# Altium footprint library Gateway_Academic.PcbLib: 49 footprints (part 3 of 4)
Each footprint in its own frame and in the unit in brackets; x right, y up, seen from the top. Pads: shape width x height; smd on the part's side, far side on the other; paste and mask are expansions set on the pad; w line width, h text height; cw(c..) or ccw(c..) is an arc to the next point about the centre after c.
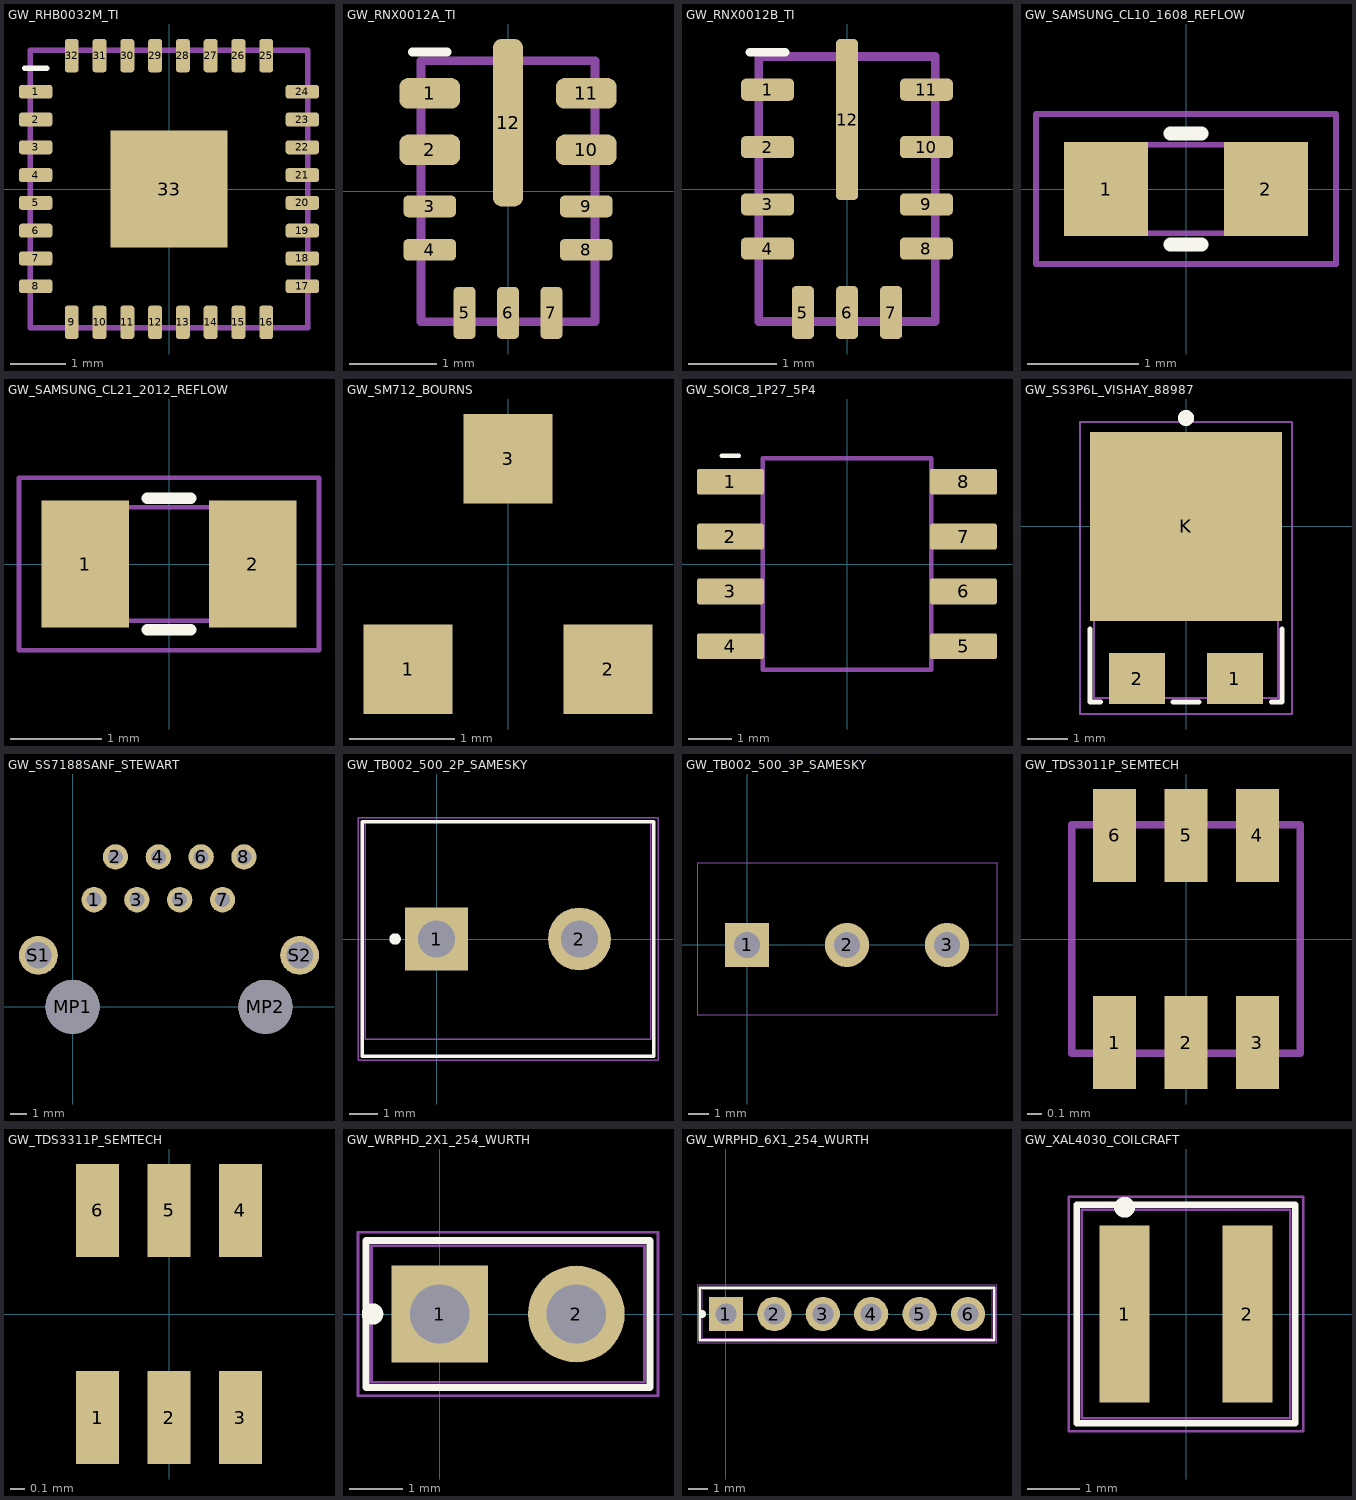
[diagram p2: the footprints below, top view; thin cyan lines are the x and y axes]

## GW_RHB0032M_TI [mm] "SNLS647I table5-1 pp5-6; exposed pad p7; RHB0032M 4223725/A PDF pp111-113; EP33 paste suppressed; four .94mm square paste windows at +/- .57mm (TI 80% example). No automatic thermal-via drill holes."
pads (33):
  rrect40% 0.6x0.25 smd paste+0 mask+0.05: 1(-2.4,1.75) 2(-2.4,1.25) 3(-2.4,0.75) 4(-2.4,0.25) 5(-2.4,-0.25) 6(-2.4,-0.75) 7(-2.4,-1.25) 8(-2.4,-1.75) 17(2.4,-1.75) 18(2.4,-1.25) 19(2.4,-0.75) 20(2.4,-0.25) 21(2.4,0.25) 22(2.4,0.75) 23(2.4,1.25) 24(2.4,1.75)
  rrect40% 0.25x0.6 smd paste+0 mask+0.05: 9(-1.75,-2.4) 10(-1.25,-2.4) 11(-0.75,-2.4) 12(-0.25,-2.4) 13(0.25,-2.4) 14(0.75,-2.4) 15(1.25,-2.4) 16(1.75,-2.4) 25(1.75,2.4) 26(1.25,2.4) 27(0.75,2.4) 28(0.25,2.4) 29(-0.25,2.4) 30(-0.75,2.4) 31(-1.25,2.4) 32(-1.75,2.4)
  rect 2.1x2.1 smd paste-1.05 mask+0.05: 33(0,0)
Top Overlay:
  lines w0.1: -2.6,2.175 -2.2,2.175
  text ".Designator" at 0,3.3 h1
Top Paste:
  rectangle: -1.04,-1.04 -0.1,-0.1
  rectangle: -1.04,0.1 -0.1,1.04
  rectangle: 0.1,-1.04 1.04,-0.1
  rectangle: 0.1,0.1 1.04,1.04
Mechanical 1:
  lines w0.1: -2.5,-2.5 2.5,-2.5 2.5,2.5 -2.5,2.5 -2.5,-2.5

## GW_RNX0012A_TI [mm] "SNVSB49D p4; RNX0012A 4222858/A PDF pp44-46 and RNX0012B 4223969/C pp47-49; Confirm actual RNX revision before use. Pin12 SW: no ground tab. Paste12 suppressed, two .25x.812mm windows at y=.2815,1.2935 per drawing; 0.125mm stencil."
pads (12):
  rrect57% 0.7x0.35 smd paste+0 mask-0.05: 1(-0.9,1.125) 2(-0.9,0.475) 10(0.9,0.475) 11(0.9,1.125)
  rrect40% 0.6x0.25 smd paste+0 mask+0.05: 3(-0.9,-0.175) 4(-0.9,-0.675) 8(0.9,-0.675) 9(0.9,-0.175)
  rrect40% 0.25x0.6 smd paste+0 mask+0.05: 5(-0.5,-1.4) 6(0,-1.4) 7(0.5,-1.4)
  rrect57% 0.35x1.925 smd paste-1 mask-0.05: 12(0,0.787)
Top Overlay:
  lines w0.1: -1.1,1.6 -0.7,1.6
Top Paste:
  rectangle: -0.125,-0.125 0.125,0.687
  rectangle: -0.125,0.887 0.125,1.699
Mechanical 1:
  lines w0.1: -1,-1.5 1,-1.5 1,1.5 -1,1.5 -1,-1.5

## GW_RNX0012B_TI [mm] "SNVSB49D p4; RNX0012A 4222858/A PDF pp44-46 and RNX0012B 4223969/C pp47-49; Confirm actual RNX revision before use. Pin12 SW: no ground tab. Paste12 suppressed, two .25x.812mm windows at y=.2815,1.2935 per drawing; 0.125mm stencil."
pads (12):
  rrect40% 0.6x0.25 smd paste+0 mask+0.07: 1(-0.9,1.125) 2(-0.9,0.475) 3(-0.9,-0.175) 4(-0.9,-0.675) 8(0.9,-0.675) 9(0.9,-0.175) 10(0.9,0.475) 11(0.9,1.125)
  rrect40% 0.25x0.6 smd paste+0 mask+0.07: 5(-0.5,-1.4) 6(0,-1.4) 7(0.5,-1.4)
  rrect40% 0.25x1.825 smd paste-1 mask+0.07: 12(0,0.787)
Top Overlay:
  lines w0.1: -1.1,1.55 -0.7,1.55
  text ".Designator" at 0,2.3 h1
Top Paste:
  rectangle: -0.125,-0.125 0.125,0.687
  rectangle: -0.125,0.887 0.125,1.699
Mechanical 1:
  lines w0.1: -1,-1.5 1,-1.5 1,1.5 -1,1.5 -1,-1.5

## GW_SAMSUNG_CL10_1608_REFLOW [mm] "SamsungMLCC_2401Jan2024p159reflow;1608+/-0.10:a.63-.73,b.71-.81,c.80-.90mm;selectedmidpointswithinranges. Pin1/2nonpolarprojectconvention;mask+.05,paste1:1."
pads (2):
  rect 0.76x0.85 smd paste+0 mask+0.05: 1(-0.72,0) 2(0.72,0)
Top Overlay:
  lines w0.127: -0.14,-0.5 0.14,-0.5 ; -0.14,0.5 0.14,0.5
Mechanical 1:
  lines w0.05: -0.8,-0.4 0.8,-0.4 0.8,0.4 -0.8,0.4 -0.8,-0.4
Mechanical 15:
  lines w0.05: -1.35,-0.675 1.35,-0.675 1.35,0.675 -1.35,0.675 -1.35,-0.675
3D body: height 0.9, standoff 0, extent -0.8,-0.4 0.8,0.4

## GW_SAMSUNG_CL21_2012_REFLOW [mm] "SamsungMLCC_2401Jan2024p159reflow;2012+/-0.20:a.83-.93,b.91-1.01,c1.35-1.45mm;selectedmidpointswithinranges. Pin1/2nonpolarprojectconvention;mask+.05,paste1:1."
pads (2):
  rect 0.96x1.4 smd paste+0 mask+0.05: 1(-0.92,0) 2(0.92,0)
Top Overlay:
  lines w0.127: -0.24,-0.725 0.24,-0.725 ; -0.24,0.725 0.24,0.725
Mechanical 1:
  lines w0.05: -1,-0.625 1,-0.625 1,0.625 -1,0.625 -1,-0.625
Mechanical 15:
  lines w0.05: -1.65,-0.95 1.65,-0.95 1.65,0.95 -1.65,0.95 -1.65,-0.95
3D body: height 1.45, standoff 0, extent -1,-0.625 1,0.625

## GW_SM712_BOURNS [mm] "Bourns CDSOT23-SM712 saved2026-11-07 pp1-2 pin diagram and Recommended Footprint; Pins1/2 bus;3 reference. +/-7/12V asymmetric clamp. Not a generic SOT23 substitution."
pads (3):
  rect 0.85x0.85 smd: 1(-0.95,-1) 2(0.95,-1) 3(0,1)

## GW_SOIC8_1P27_5P4 [mm] "SLLSF78B table4-1 p3; D0008A 4214825/C PDF pp30-32; DS20005991B pin table p3; C04-2057-OA RevE p19;"
pads (8):
  rrect17% 1.55x0.6 smd paste+0 mask+0.07: 1(-2.7,1.905) 2(-2.7,0.635) 3(-2.7,-0.635) 4(-2.7,-1.905) 5(2.7,-1.905) 6(2.7,-0.635) 7(2.7,0.635) 8(2.7,1.905)
Top Overlay:
  lines w0.1: -2.9,2.505 -2.5,2.505
  text ".Designator" at 0,2.805 h1
Mechanical 1:
  lines w0.1: -1.95,-2.45 1.95,-2.45 1.95,2.45 -1.95,2.45 -1.95,-2.45

## GW_SS3P6L_VISHAY_88987 [mm] "Vishay88987 Rev24-Apr-2020 pp1,4; numbered anodes1/2, cathodeK; minimum mounting lands; K large upper pad,1 lower right,2 lower left in package-view orientation. Small-pad gap1.04; overallheight6.80. OriginK center. Board thermal copper and stencil pending. Reject supplied VIS mapping."
pads (3):
  rect 1.4x1.27 smd: 1(1.22,-3.805) 2(-1.22,-3.805)
  rect 4.8x4.72 smd: K(0,0)
Top Overlay:
  circle w0.2: c0,2.71 r0.1
  lines w0.127: -2.4,-2.565 -2.4,-4.39 -2.14,-4.39 ; -0.32,-4.39 0.32,-4.39 ; 2.14,-4.39 2.4,-4.39 2.4,-2.565
Mechanical 1:
  lines w0.05: -2.3,-4.29 2.3,-4.29 2.3,2.21 -2.3,2.21 -2.3,-4.29
Mechanical 15:
  lines w0.05: -2.65,-4.69 2.65,-4.69 2.65,2.61 -2.65,2.61 -2.65,-4.69
3D body: height 1.2, standoff 0, extent -2.3,-4.29 2.3,2.21

## GW_SS7188SANF_STEWART [mm] "Cinch/Stewart CT710001 revB0 10-Jul-2023 component-side recommended hole layout; Holes/positions from drawing; signal1..8=.89drill, shield1.57, mounts3.2NPTH. Copper lands1.5/2.3 are ENGINEERING CANDIDATES; fab annular ring/finished holes/body edge pending."
pads (12):
  round 1.5 hole 0.889: 1(1.27,6.35) 2(2.54,8.89) 3(3.81,6.35) 4(5.08,8.89) 5(6.35,6.35) 6(7.62,8.89) 7(8.89,6.35) 8(10.16,8.89)
  round 3.2 hole 3.2 unplated: MP1(0,0) MP2(11.43,0)
  round 2.3 hole 1.575: S1(-2.032,3.048) S2(13.462,3.048)

## GW_TB002_500_2P_SAMESKY [mm] "Same Sky TB002-500 Rev1.04 09/12/2024 p1 order key,p2 PCB layout;5mm pitch,1.30mm drilled holes;2.20mm copper diameter prototype annular-ring choice;wire-entryfront=-Y;project assigns1left+Xsequence."
pads (2):
  rect 2.2x2.2 hole 1.3 paste-10 mask+0.1: 1(0,0)
  round 2.2 hole 1.3 paste-10 mask+0.1: 2(5,0)
Top Overlay:
  circle w0.2: c-1.45,0 r0.1
  lines w0.127: -2.6,-4.1 7.6,-4.1 7.6,4.1 -2.6,4.1 -2.6,-4.1
Mechanical 1:
  lines w0.05: -2.5,-3.5 7.5,-3.5 7.5,4.1 -2.5,4.1 -2.5,-3.5
Mechanical 15:
  lines w0.05: -2.75,-4.25 7.75,-4.25 7.75,4.25 -2.75,4.25 -2.75,-4.25
3D body: height 10, standoff 0, extent -2.5,-4 7.5,4

## GW_TB002_500_3P_SAMESKY [mm] "Same Sky TB002-500 Rev1.04 09/12/2024 p1 order key,p2 PCB layout;5mm pitch,1.30mm drilled holes;2.20mm copper diameter prototype annular-ring choice;wire-entryfront=-Y;project assigns1left+Xsequence."
pads (3):
  rect 2.2x2.2 hole 1.3 paste-10 mask+0.1: 1(0,0)
  round 2.2 hole 1.3 paste-10 mask+0.1: 2(5,0) 3(10,0)
Mechanical 1:
  lines w0.05: -2.5,-3.5 12.5,-3.5 12.5,4.1 -2.5,4.1 -2.5,-3.5

## GW_TDS3011P_SEMTECH [mm] "Semtech TDS3011P Rev2.0 16-Jun-2021 pp5-7; p6 reference land pattern; Top view rotated to Fig3 p5: bottom1/2/3 GND, top6/5/4 IN. Pitch .5; innergap .8; extent2.1; rowcenters1.45. Mask/stencil DFM pending."
pads (6):
  rect 0.3x0.65 smd: 1(-0.5,-0.725) 2(0,-0.725) 3(0.5,-0.725) 4(0.5,0.725) 5(0,0.725) 6(-0.5,0.725)
Mechanical 1:
  lines w0.05: -0.8,-0.8 0.8,-0.8 0.8,0.8 -0.8,0.8 -0.8,-0.8

## GW_TDS3311P_SEMTECH [mm] "Semtech TDS3311P Rev2.4 pp2,7-9; official product portal confirms33V orderTDS3311P.C; Manufacturer reference lands; all1/2/3GND and4/5/6IN. Mask+.025 and1:1paste are prototype process choices."
pads (6):
  rect 0.3x0.65 smd paste+0 mask+0.025: 1(-0.5,-0.725) 2(0,-0.725) 3(0.5,-0.725) 4(0.5,0.725) 5(0,0.725) 6(-0.5,0.725)

## GW_WRPHD_2X1_254_WURTH [mm] "Wurth 61300211121 official datasheet p1 dimensions/recommended hole pattern;1.10mm holes2.54pitch;copper1.8mm diameter/mask+.1 prototype process selection;pin1markedend,sequence+X."
pads (2):
  rect 1.8x1.8 hole 1.1 paste-10 mask+0.1: 1(0,0)
  round 1.8 hole 1.1 paste-10 mask+0.1: 2(2.54,0)
Top Overlay:
  circle w0.2: c-1.25,0 r0.1
  lines w0.127: -1.37,-1.37 3.91,-1.37 3.91,1.37 -1.37,1.37 -1.37,-1.37
Mechanical 1:
  lines w0.05: -1.27,-1.27 3.81,-1.27 3.81,1.27 -1.27,1.27 -1.27,-1.27
Mechanical 15:
  lines w0.05: -1.52,-1.52 4.06,-1.52 4.06,1.52 -1.52,1.52 -1.52,-1.52
3D body: height 2.54, standoff 0, extent -1.27,-1.27 3.81,1.27

## GW_WRPHD_6X1_254_WURTH [mm] "Wurth 61300611121 official datasheet p1 dimensions/recommended hole pattern;1.10mm holes2.54pitch;copper1.8mm diameter/mask+.1 prototype process selection;pin1markedend,sequence+X."
pads (6):
  rect 1.8x1.8 hole 1.1 paste-10 mask+0.1: 1(0,0)
  round 1.8 hole 1.1 paste-10 mask+0.1: 2(2.54,0) 3(5.08,0) 4(7.62,0) 5(10.16,0) 6(12.7,0)
Top Overlay:
  circle w0.2: c-1.25,0 r0.1
  lines w0.127: -1.37,-1.37 14.07,-1.37 14.07,1.37 -1.37,1.37 -1.37,-1.37
Mechanical 1:
  lines w0.05: -1.27,-1.27 13.97,-1.27 13.97,1.27 -1.27,1.27 -1.27,-1.27
Mechanical 15:
  lines w0.05: -1.52,-1.52 14.22,-1.52 14.22,1.52 -1.52,1.52 -1.52,-1.52
3D body: height 2.54, standoff 0, extent -1.27,-1.27 13.97,1.27

## GW_XAL4030_COILCRAFT [mil] "Coilcraft document806-4 revised02/25/26 Recommended Land Pattern; Terminals assigned project1/2 for nonpolar winding; place high dv/dt at stripe/terminal1. Height 3.1mm. Mask/paste DFM pending."
pads (2):
  rect 38x134 smd: 1(-46.5,0) 2(46.5,0)
Top Overlay:
  circle w7.87: c-46.5,80.78 r3.94
  lines w5: -82.68,-82.68 82.68,-82.68 82.68,82.68 -82.68,82.68 -82.68,-82.68
Mechanical 1:
  lines w1.97: -78.74,-78.74 78.74,-78.74 78.74,78.74 -78.74,78.74 -78.74,-78.74
Mechanical 15:
  lines w1.97: -88.58,-88.58 88.58,-88.58 88.58,88.58 -88.58,88.58 -88.58,-88.58
3D body: height 122.05, standoff 0, extent -78.74,-78.74 78.74,78.74